# Altium footprint library WR-BHD.PcbLib: 220 footprints (part 9 of 14)
Each footprint in its own frame and in the unit in brackets; x right, y up, seen from the top. Pads: shape width x height; smd on the part's side, far side on the other; paste and mask are expansions set on the pad; w line width, h text height; cw(c..) or ccw(c..) is an arc to the next point about the centre after c.
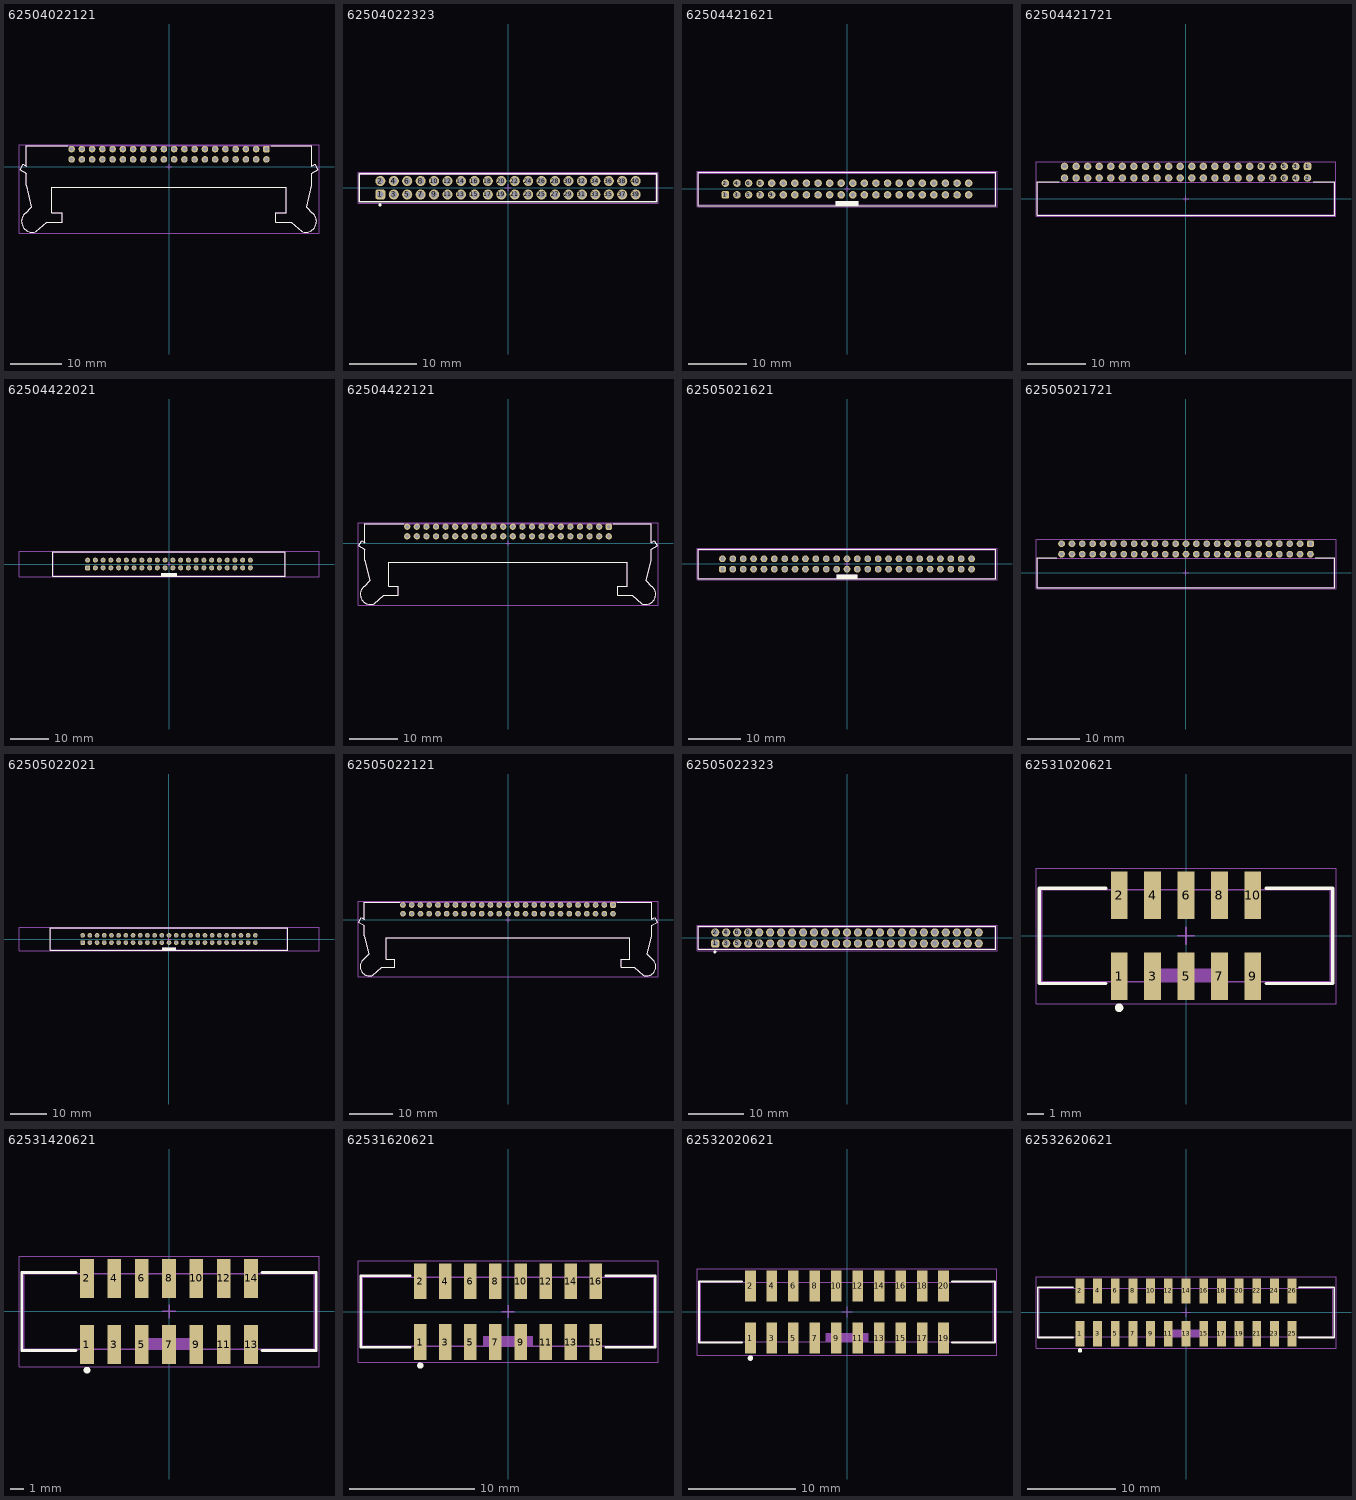
[diagram p8: the footprints below, top view; thin cyan lines are the x and y axes]

## 62504022121 [mm] "2.00mm Male Angled Box Header with Lever, 40p"
height 3.15
pads (40):
  rrect50% 1.3x1.3 hole 0.8: 1(19,3.4)
  round 1.3 hole 0.8: 2(19,1.4) 3(17,3.4) 4(17,1.4) 5(15,3.4) 6(15,1.4) 7(13,3.4) 8(13,1.4) 9(11,3.4) 10(11,1.4) 11(9,3.4) 12(9,1.4) 13(7,3.4) 14(7,1.4) 15(5,3.4) 16(5,1.4) 17(3,3.4) 18(3,1.4) 19(1,3.4) 20(1,1.4) 21(-1,3.4) 22(-1,1.4) 23(-3,3.4) 24(-3,1.4) 25(-5,3.4) 26(-5,1.4) 27(-7,3.4) 28(-7,1.4) 29(-9,3.4) 30(-9,1.4) 31(-11,3.4) 32(-11,1.4) 33(-13,3.4) 34(-13,1.4) 35(-15,3.4) 36(-15,1.4) 37(-17,3.4) 38(-17,1.4) 39(-19,3.4) 40(-19,1.4)
Top Overlay:
  lines w0.2: -28.466,0.438 -29.06,-0.59 -27.851,-1.288 -27.851,-3.622 ; -28.46,0.44 -27.848,0.087 ; -27.894,-8.986 ccw(c-26.68,-10.7) -25.865,-12.635 ; -27.892,-8.989 -26.85,-7.91 -27.837,-3.637 ; -27.85,0.089 -27.85,4.05 -19.75,4.05 ; -25.866,-12.634 -23.85,-10.85 -20.85,-10.85 -20.85,-9.05 -22.85,-9.05 -22.85,-4.05 22.85,-4.05 22.85,-9.05 20.85,-9.05 20.85,-10.85 23.85,-10.85 25.866,-12.634 ; 19.95,4.05 27.85,4.05 27.85,0.089 ; 25.865,-12.635 ccw(c26.68,-10.7) 27.894,-8.986 ; 27.837,-3.637 26.85,-7.91 27.892,-8.989 ; 27.848,0.087 28.46,0.44 ; 27.851,-3.622 27.851,-1.288 29.06,-0.59 28.466,0.438
Top Designator:
  text ".Designator" at -3.647,-0.357 h1
Top 3D Body:
  lines w0.1: -28.466,0.438 -29.06,-0.59 -27.851,-1.288 -27.851,-3.622 ; -28.46,0.44 -27.848,0.087 ; -27.894,-8.986 ccw(c-26.68,-10.7) -25.865,-12.635 ; -27.892,-8.989 -26.85,-7.91 -27.837,-3.637 ; -27.85,0.089 -27.85,4.05 27.85,4.05 ; -25.866,-12.634 -23.85,-10.85 -20.85,-10.85 -20.85,-9.05 -22.85,-9.05 -22.85,-4.05 22.85,-4.05 22.85,-9.05 20.85,-9.05 20.85,-10.85 23.85,-10.85 25.866,-12.634 ; 25.865,-12.635 ccw(c26.68,-10.7) 27.894,-8.986 ; 27.837,-3.637 26.85,-7.91 27.892,-8.989 ; 27.848,0.087 28.46,0.44 ; 27.848,4.048 27.85,4.05 ; 27.85,0.089 27.85,4.05 ; 27.851,-3.622 27.851,-1.288 29.06,-0.59 28.466,0.438
Top Courtyard:
  lines w0.05: -29.262,-13 29.262,-13 29.262,4.25 -29.262,4.25 -29.262,-13
Top Component Center:
  lines w0.1: -0.5,0 0.5,0 ; 0,-0.5 0,0.5
3D body "62504022121.stp": height 6.1, standoff -3.05, extent -29.062,-12.8 29.062,4.05

## 62504022323 [mm] "Board to Cable Transition Connector, pitch 2mm, 40p"
height 5
pads (40):
  rrect50% 1.5x1.5 hole 1: 1(-19,-1)
  round 1.5 hole 1: 2(-19,1) 3(-17,-1) 4(-17,1) 5(-15,-1) 6(-15,1) 7(-13,-1) 8(-13,1) 9(-11,-1) 10(-11,1) 11(-9,-1) 12(-9,1) 13(-7,-1) 14(-7,1) 15(-5,-1) 16(-5,1) 17(-3,-1) 18(-3,1) 19(-1,-1) 20(-1,1) 21(1,-1) 22(1,1) 23(3,-1) 24(3,1) 25(5,-1) 26(5,1) 27(7,-1) 28(7,1) 29(9,-1) 30(9,1) 31(11,-1) 32(11,1) 33(13,-1) 34(13,1) 35(15,-1) 36(15,1) 37(17,-1) 38(17,1) 39(19,-1) 40(19,1)
Top Overlay:
  circle w0.25: c-19.05,-2.55 r0.125
  lines w0.2: -22.125,-2.1 -22.125,2.1 22.125,2.1 22.125,-2.1 -22.125,-2.1
Top Assembly:
  lines w0.1: -22.05,-2 -22.05,2 22.05,2 22.05,-2 -22.05,-2
Top Designator:
  text ".Designator" at -3.647,-0.357 h1
Top 3D Body:
  lines w0.1: -22.05,-2 22.05,-2 22.05,2 -22.05,2 -22.05,-2
Top Courtyard:
  lines w0.05: -22.325,-2.3 22.325,-2.3 22.325,2.3 -22.325,2.3 -22.325,-2.3
Top Component Center:
  lines w0.1: -0.5,0 0.5,0 ; 0,-0.5 0,0.5
3D body "62504022323.stp": height 7.23, standoff -2.77, extent -22.05,-2 22.05,2

## 62504421621 [mm] "2.00mm Male Box Header, 44p"
height 5.6
pads (44):
  rrect50% 1.3x1.3 hole 0.8: 1(-21,-1)
  round 1.3 hole 0.8: 2(-21,1) 3(-19,-1) 4(-19,1) 5(-17,-1) 6(-17,1) 7(-15,-1) 8(-15,1) 9(-13,-1) 10(-13,1) 11(-11,-1) 12(-11,1) 13(-9,-1) 14(-9,1) 15(-7,-1) 16(-7,1) 17(-5,-1) 18(-5,1) 19(-3,-1) 20(-3,1) 21(-1,-1) 22(-1,1) 23(1,-1) 24(1,1) 25(3,-1) 26(3,1) 27(5,-1) 28(5,1) 29(7,-1) 30(7,1) 31(9,-1) 32(9,1) 33(11,-1) 34(11,1) 35(13,-1) 36(13,1) 37(15,-1) 38(15,1) 39(17,-1) 40(17,1) 41(19,-1) 42(19,1) 43(21,-1) 44(21,1)
Top Overlay:
  rectangle: -2,-2.85 2,-2.05
  lines w0.2: -25.7,-2.85 -25.7,2.85 25.7,2.85 25.7,-2.85 -25.7,-2.85
Top Assembly:
  rectangle: -2,-2.75 2,-2.05
  lines w0.1: -25.6,-2.75 25.6,-2.75 25.6,2.75 -25.6,2.75 -25.6,-2.75
Top Designator:
  text ".Designator" at -3.647,-0.357 h1
Top 3D Body:
  rectangle: -2,-2.75 2,-2.05
  lines w0.1: -25.6,-2.75 -25.6,2.75 25.6,2.75 25.6,-2.75 -25.6,-2.75
Top Courtyard:
  lines w0.05: -25.9,-3.05 25.9,-3.05 25.9,3.05 -25.9,3.05 -25.9,-3.05
Top Component Center:
  lines w0.1: -0.5,0 0.5,0 ; 0,-0.5 0,0.5
3D body "62504421621.stp": height 5.65, standoff -2.5, extent -25.6,-2.75 25.6,2.75

## 62504421721 [mm] "2.00mm Male Angled Box Header, 44p"
height 5.4
pads (44):
  rrect50% 1.3x1.3 hole 0.8: 1(21,5.55)
  round 1.3 hole 0.8: 2(21,3.55) 3(19,5.55) 4(19,3.55) 5(17,5.55) 6(17,3.55) 7(15,5.55) 8(15,3.55) 9(13,5.55) 10(13,3.55) 11(11,5.55) 12(11,3.55) 13(9,5.55) 14(9,3.55) 15(7,5.55) 16(7,3.55) 17(5,5.55) 18(5,3.55) 19(3,5.55) 20(3,3.55) 21(1,5.55) 22(1,3.55) 23(-1,5.55) 24(-1,3.55) 25(-3,5.55) 26(-3,3.55) 27(-5,5.55) 28(-5,3.55) 29(-7,5.55) 30(-7,3.55) 31(-9,5.55) 32(-9,3.55) 33(-11,5.55) 34(-11,3.55) 35(-13,5.55) 36(-13,3.55) 37(-15,5.55) 38(-15,3.55) 39(-17,5.55) 40(-17,3.55) 41(-19,5.55) 42(-19,3.55) 43(-21,5.55) 44(-21,3.55)
Top Overlay:
  lines w0.2: -21.9,2.9 -25.725,2.9 -25.725,-2.9 25.725,-2.9 25.725,2.9 21.95,2.9
Top Assembly:
  lines w0.1: -25.6,-2.8 25.6,-2.8 25.6,2.8 -25.6,2.8 -25.6,-2.8
Top Designator:
  text ".Designator" at -3.647,-0.357 h1
Top 3D Body:
  lines w0.1: -25.6,-2.8 -25.6,2.8 25.6,2.8 25.6,-2.8 -25.6,-2.8
Top Courtyard:
  lines w0.05: -25.925,-3.1 25.925,-3.1 25.925,6.4 -25.925,6.4 -25.925,-3.1
Top Component Center:
  lines w0.1: -0.5,0 0.5,0 ; 0,-0.5 0,0.5
3D body "62504421721 (rev1).stp": height 5.5, standoff -2.85, extent -25.6,-2.8 25.6,5.8

## 62504422021 [mm] "2.00mm Male Box Header with Lever, 44p"
height 16.85
pads (44):
  rrect50% 1.3x1.3 hole 0.8: 1(-21,-1)
  round 1.3 hole 0.8: 2(-21,1) 3(-19,-1) 4(-19,1) 5(-17,-1) 6(-17,1) 7(-15,-1) 8(-15,1) 9(-13,-1) 10(-13,1) 11(-11,-1) 12(-11,1) 13(-9,-1) 14(-9,1) 15(-7,-1) 16(-7,1) 17(-5,-1) 18(-5,1) 19(-3,-1) 20(-3,1) 21(-1,-1) 22(-1,1) 23(1,-1) 24(1,1) 25(3,-1) 26(3,1) 27(5,-1) 28(5,1) 29(7,-1) 30(7,1) 31(9,-1) 32(9,1) 33(11,-1) 34(11,1) 35(13,-1) 36(13,1) 37(15,-1) 38(15,1) 39(17,-1) 40(17,1) 41(19,-1) 42(19,1) 43(21,-1) 44(21,1)
Top Overlay:
  rectangle: -2,-3.1 2,-2.3
  lines w0.2: -30,-3.1 30,-3.1 30,3.1 -30,3.1 -30,-3.1
Top Assembly:
  rectangle: -2,-3 2,-2.3
  lines w0.1: -29.85,-3 29.85,-3 29.85,3 -29.85,3 -29.85,-3
Top Designator:
  text ".Designator" at -3.647,-0.357 h1
Top 3D Body:
  rectangle: -2,-3 2,-2.3
  lines w0.1: -29.85,-3 -29.85,3 29.85,3 29.85,-3 -29.85,-3
Top Courtyard:
  lines w0.05: -38.7,-3.3 -38.7,3.3 38.7,3.3 38.7,-3.3 -38.7,-3.3
Top Component Center:
  lines w0.1: -0.5,0 0.5,0 ; 0,-0.5 0,0.5
3D body "62504422021.stp": height 16.9, standoff -2.95, extent -31.062,-3 31.063,3

## 62504422121 [mm] "2.00mm Male Angled Box Header with Lever, 44p"
height 3.15
pads (44):
  rrect50% 1.3x1.3 hole 0.8: 1(21,3.4)
  round 1.3 hole 0.8: 2(21,1.4) 3(19,3.4) 4(19,1.4) 5(17,3.4) 6(17,1.4) 7(15,3.4) 8(15,1.4) 9(13,3.4) 10(13,1.4) 11(11,3.4) 12(11,1.4) 13(9,3.4) 14(9,1.4) 15(7,3.4) 16(7,1.4) 17(5,3.4) 18(5,1.4) 19(3,3.4) 20(3,1.4) 21(1,3.4) 22(1,1.4) 23(-1,3.4) 24(-1,1.4) 25(-3,3.4) 26(-3,1.4) 27(-5,3.4) 28(-5,1.4) 29(-7,3.4) 30(-7,1.4) 31(-9,3.4) 32(-9,1.4) 33(-11,3.4) 34(-11,1.4) 35(-13,3.4) 36(-13,1.4) 37(-15,3.4) 38(-15,1.4) 39(-17,3.4) 40(-17,1.4) 41(-19,3.4) 42(-19,1.4) 43(-21,3.4) 44(-21,1.4)
Top Overlay:
  lines w0.2: -30.466,0.438 -31.06,-0.59 -29.851,-1.288 -29.851,-3.622 ; -30.46,0.44 -29.848,0.087 ; -29.894,-8.986 ccw(c-28.68,-10.7) -27.865,-12.635 ; -29.892,-8.989 -28.85,-7.91 -29.837,-3.637 ; -29.85,0.089 -29.85,4.05 -21.75,4.05 ; -27.866,-12.634 -25.85,-10.85 -22.85,-10.85 -22.85,-9.05 -24.85,-9.05 -24.85,-4.05 24.85,-4.05 24.85,-9.05 22.85,-9.05 22.85,-10.85 25.85,-10.85 27.866,-12.634 ; 21.95,4.05 29.85,4.05 29.85,0.089 ; 27.865,-12.635 ccw(c28.68,-10.7) 29.894,-8.986 ; 29.837,-3.637 28.85,-7.91 29.892,-8.989 ; 29.848,0.087 30.46,0.44 ; 29.851,-3.622 29.851,-1.288 31.06,-0.59 30.466,0.438
Top Designator:
  text ".Designator" at -3.647,-0.357 h1
Top 3D Body:
  lines w0.1: -30.466,0.438 -31.06,-0.59 -29.851,-1.288 -29.851,-3.622 ; -30.46,0.44 -29.848,0.087 ; -29.894,-8.986 ccw(c-28.68,-10.7) -27.865,-12.635 ; -29.892,-8.989 -28.85,-7.91 -29.837,-3.637 ; -29.85,0.089 -29.85,4.05 29.85,4.05 ; -27.866,-12.634 -25.85,-10.85 -22.85,-10.85 -22.85,-9.05 -24.85,-9.05 -24.85,-4.05 24.85,-4.05 24.85,-9.05 22.85,-9.05 22.85,-10.85 25.85,-10.85 27.866,-12.634 ; 27.865,-12.635 ccw(c28.68,-10.7) 29.894,-8.986 ; 29.837,-3.637 28.85,-7.91 29.892,-8.989 ; 29.848,0.087 30.46,0.44 ; 29.848,4.048 29.85,4.05 ; 29.85,0.089 29.85,4.05 ; 29.851,-3.622 29.851,-1.288 31.06,-0.59 30.466,0.438
Top Courtyard:
  lines w0.05: -31.262,-13 31.262,-13 31.262,4.25 -31.262,4.25 -31.262,-13
Top Component Center:
  lines w0.1: -0.5,0 0.5,0 ; 0,-0.5 0,0.5
3D body "62504422121.stp": height 6.1, standoff -3.05, extent -31.062,-12.8 31.062,4.05

## 62505021621 [mm] "2.00mm Male Box Header, 50p"
height 5.6
pads (50):
  rrect50% 1.3x1.3 hole 0.8: 1(-24,-1)
  round 1.3 hole 0.8: 2(-24,1) 3(-22,-1) 4(-22,1) 5(-20,-1) 6(-20,1) 7(-18,-1) 8(-18,1) 9(-16,-1) 10(-16,1) 11(-14,-1) 12(-14,1) 13(-12,-1) 14(-12,1) 15(-10,-1) 16(-10,1) 17(-8,-1) 18(-8,1) 19(-6,-1) 20(-6,1) 21(-4,-1) 22(-4,1) 23(-2,-1) 24(-2,1) 25(0,-1) 26(0,1) 27(2,-1) 28(2,1) 29(4,-1) 30(4,1) 31(6,-1) 32(6,1) 33(8,-1) 34(8,1) 35(10,-1) 36(10,1) 37(12,-1) 38(12,1) 39(14,-1) 40(14,1) 41(16,-1) 42(16,1) 43(18,-1) 44(18,1) 45(20,-1) 46(20,1) 47(22,-1) 48(22,1) 49(24,-1) 50(24,1)
Top Overlay:
  rectangle: -2,-2.85 2,-2.05
  lines w0.2: -28.7,-2.85 -28.7,2.85 28.7,2.85 28.7,-2.85 -28.7,-2.85
Top Assembly:
  rectangle: -2,-2.75 2,-2.05
  lines w0.1: -28.6,-2.75 28.6,-2.75 28.6,2.75 -28.6,2.75 -28.6,-2.75
Top Designator:
  text ".Designator" at -3.647,-0.357 h1
Top 3D Body:
  rectangle: -2,-2.75 2,-2.05
  lines w0.1: -28.6,-2.75 -28.6,2.75 28.6,2.75 28.6,-2.75 -28.6,-2.75
Top Courtyard:
  lines w0.05: -28.9,-3.05 28.9,-3.05 28.9,3.05 -28.9,3.05 -28.9,-3.05
Top Component Center:
  lines w0.1: -0.5,0 0.5,0 ; 0,-0.5 0,0.5
3D body "62505021621.stp": height 5.65, standoff -2.45, extent -28.6,-2.75 28.6,2.75

## 62505021721 [mm] "2.00mm Male Angled Box Header, 50p"
height 5.4
pads (50):
  rrect50% 1.3x1.3 hole 0.8: 1(24,5.55)
  round 1.3 hole 0.8: 2(24,3.55) 3(22,5.55) 4(22,3.55) 5(20,5.55) 6(20,3.55) 7(18,5.55) 8(18,3.55) 9(16,5.55) 10(16,3.55) 11(14,5.55) 12(14,3.55) 13(12,5.55) 14(12,3.55) 15(10,5.55) 16(10,3.55) 17(8,5.55) 18(8,3.55) 19(6,5.55) 20(6,3.55) 21(4,5.55) 22(4,3.55) 23(2,5.55) 24(2,3.55) 25(0,5.55) 26(0,3.55) 27(-2,5.55) 28(-2,3.55) 29(-4,5.55) 30(-4,3.55) 31(-6,5.55) 32(-6,3.55) 33(-8,5.55) 34(-8,3.55) 35(-10,5.55) 36(-10,3.55) 37(-12,5.55) 38(-12,3.55) 39(-14,5.55) 40(-14,3.55) 41(-16,5.55) 42(-16,3.55) 43(-18,5.55) 44(-18,3.55) 45(-20,5.55) 46(-20,3.55) 47(-22,5.55) 48(-22,3.55) 49(-24,5.55) 50(-24,3.55)
Top Overlay:
  lines w0.2: -24.9,2.9 -28.725,2.9 -28.725,-2.9 28.725,-2.9 28.725,2.9 24.95,2.9
Top Assembly:
  lines w0.1: -28.6,-2.8 28.6,-2.8 28.6,2.8 -28.6,2.8 -28.6,-2.8
Top Designator:
  text ".Designator" at -3.647,-0.357 h1
Top 3D Body:
  lines w0.1: -28.6,-2.8 -28.6,2.8 28.6,2.8 28.6,-2.8 -28.6,-2.8
Top Courtyard:
  lines w0.05: -28.925,-3.1 28.925,-3.1 28.925,6.4 -28.925,6.4 -28.925,-3.1
Top Component Center:
  lines w0.1: -0.5,0 0.5,0 ; 0,-0.5 0,0.5
3D body "62505021721 (rev1).stp": height 5.5, standoff -2.85, extent -28.6,-2.8 28.6,5.8

## 62505022021 [mm] "2.00mm Male Box Header with Lever, 50p"
height 16.85
pads (50):
  rrect50% 1.3x1.3 hole 0.8: 1(-24,-1)
  round 1.3 hole 0.8: 2(-24,1) 3(-22,-1) 4(-22,1) 5(-20,-1) 6(-20,1) 7(-18,-1) 8(-18,1) 9(-16,-1) 10(-16,1) 11(-14,-1) 12(-14,1) 13(-12,-1) 14(-12,1) 15(-10,-1) 16(-10,1) 17(-8,-1) 18(-8,1) 19(-6,-1) 20(-6,1) 21(-4,-1) 22(-4,1) 23(-2,-1) 24(-2,1) 25(0,-1) 26(0,1) 27(2,-1) 28(2,1) 29(4,-1) 30(4,1) 31(6,-1) 32(6,1) 33(8,-1) 34(8,1) 35(10,-1) 36(10,1) 37(12,-1) 38(12,1) 39(14,-1) 40(14,1) 41(16,-1) 42(16,1) 43(18,-1) 44(18,1) 45(20,-1) 46(20,1) 47(22,-1) 48(22,1) 49(24,-1) 50(24,1)
Top Overlay:
  rectangle: -2,-3.1 2,-2.3
  lines w0.2: -33,-3.1 33,-3.1 33,3.1 -33,3.1 -33,-3.1
Top Assembly:
  rectangle: -2,-3 2,-2.3
  lines w0.1: -32.85,-3 32.85,-3 32.85,3 -32.85,3 -32.85,-3
Top Designator:
  text ".Designator" at -3.647,-0.357 h1
Top 3D Body:
  rectangle: -2,-3 2,-2.3
  lines w0.1: -32.85,-3 -32.85,3 32.85,3 32.85,-3 -32.85,-3
Top Courtyard:
  lines w0.05: -41.7,-3.3 -41.7,3.3 41.7,3.3 41.7,-3.3 -41.7,-3.3
Top Component Center:
  lines w0.1: -0.5,0 0.5,0 ; 0,-0.5 0,0.5
3D body "62505022021.stp": height 16.9, standoff -2.95, extent -34.062,-3 34.063,3

## 62505022121 [mm] "2.00mm Male Angled Box Header with Lever, 50p"
height 3.15
pads (50):
  rrect50% 1.3x1.3 hole 0.8: 1(24,3.4)
  round 1.3 hole 0.8: 2(24,1.4) 3(22,3.4) 4(22,1.4) 5(20,3.4) 6(20,1.4) 7(18,3.4) 8(18,1.4) 9(16,3.4) 10(16,1.4) 11(14,3.4) 12(14,1.4) 13(12,3.4) 14(12,1.4) 15(10,3.4) 16(10,1.4) 17(8,3.4) 18(8,1.4) 19(6,3.4) 20(6,1.4) 21(4,3.4) 22(4,1.4) 23(2,3.4) 24(2,1.4) 25(0,3.4) 26(0,1.4) 27(-2,3.4) 28(-2,1.4) 29(-4,3.4) 30(-4,1.4) 31(-6,3.4) 32(-6,1.4) 33(-8,3.4) 34(-8,1.4) 35(-10,3.4) 36(-10,1.4) 37(-12,3.4) 38(-12,1.4) 39(-14,3.4) 40(-14,1.4) 41(-16,3.4) 42(-16,1.4) 43(-18,3.4) 44(-18,1.4) 45(-20,3.4) 46(-20,1.4) 47(-22,3.4) 48(-22,1.4) 49(-24,3.4) 50(-24,1.4)
Top Overlay:
  lines w0.2: -33.466,0.438 -34.06,-0.59 -32.851,-1.288 -32.851,-3.622 ; -33.46,0.44 -32.848,0.087 ; -32.894,-8.986 ccw(c-31.68,-10.7) -30.865,-12.635 ; -32.892,-8.989 -31.85,-7.91 -32.837,-3.637 ; -32.85,0.089 -32.85,4.05 -24.75,4.05 ; -30.866,-12.634 -28.85,-10.85 -25.85,-10.85 -25.85,-9.05 -27.85,-9.05 -27.85,-4.05 27.85,-4.05 27.85,-9.05 25.85,-9.05 25.85,-10.85 28.85,-10.85 30.866,-12.634 ; 24.95,4.05 32.85,4.05 32.85,0.089 ; 30.865,-12.635 ccw(c31.68,-10.7) 32.894,-8.986 ; 32.837,-3.637 31.85,-7.91 32.892,-8.989 ; 32.848,0.087 33.46,0.44 ; 32.851,-3.622 32.851,-1.288 34.06,-0.59 33.466,0.438
Top Designator:
  text ".Designator" at -3.647,-0.357 h1
Top 3D Body:
  lines w0.1: -33.466,0.438 -34.06,-0.59 -32.851,-1.288 -32.851,-3.622 ; -33.46,0.44 -32.848,0.087 ; -32.894,-8.986 ccw(c-31.68,-10.7) -30.865,-12.635 ; -32.892,-8.989 -31.85,-7.91 -32.837,-3.637 ; -32.85,0.089 -32.85,4.05 32.85,4.05 ; -30.866,-12.634 -28.85,-10.85 -25.85,-10.85 -25.85,-9.05 -27.85,-9.05 -27.85,-4.05 27.85,-4.05 27.85,-9.05 25.85,-9.05 25.85,-10.85 28.85,-10.85 30.866,-12.634 ; 30.865,-12.635 ccw(c31.68,-10.7) 32.894,-8.986 ; 32.837,-3.637 31.85,-7.91 32.892,-8.989 ; 32.848,0.087 33.46,0.44 ; 32.848,4.048 32.85,4.05 ; 32.85,0.089 32.85,4.05 ; 32.851,-3.622 32.851,-1.288 34.06,-0.59 33.466,0.438
Top Courtyard:
  lines w0.05: -34.262,-13 -34.262,4.25 34.262,4.25 34.262,-13 -34.262,-13
Top Component Center:
  lines w0.1: -0.5,0 0.5,0 ; 0,-0.5 0,0.5
3D body "62505022121.stp": height 6.1, standoff -3.05, extent -34.062,-12.8 34.062,4.05

## 62505022323 [mm] "Board to Cable Transition Connector, pitch 2mm, 50p"
height 5
pads (50):
  rrect50% 1.5x1.5 hole 1: 1(-24,-1)
  round 1.5 hole 1: 2(-24,1) 3(-22,-1) 4(-22,1) 5(-20,-1) 6(-20,1) 7(-18,-1) 8(-18,1) 9(-16,-1) 10(-16,1) 11(-14,-1) 12(-14,1) 13(-12,-1) 14(-12,1) 15(-10,-1) 16(-10,1) 17(-8,-1) 18(-8,1) 19(-6,-1) 20(-6,1) 21(-4,-1) 22(-4,1) 23(-2,-1) 24(-2,1) 25(0,-1) 26(0,1) 27(2,-1) 28(2,1) 29(4,-1) 30(4,1) 31(6,-1) 32(6,1) 33(8,-1) 34(8,1) 35(10,-1) 36(10,1) 37(12,-1) 38(12,1) 39(14,-1) 40(14,1) 41(16,-1) 42(16,1) 43(18,-1) 44(18,1) 45(20,-1) 46(20,1) 47(22,-1) 48(22,1) 49(24,-1) 50(24,1)
Top Overlay:
  circle w0.25: c-24.05,-2.55 r0.125
  lines w0.2: -27.125,-2.1 27.125,-2.1 27.125,2.1 -27.125,2.1 -27.125,-2.1
Top Assembly:
  lines w0.1: -27.05,-2 27.05,-2 27.05,2 -27.05,2 -27.05,-2
Top Designator:
  text ".Designator" at -3.647,-0.357 h1
Top 3D Body:
  lines w0.1: -27.05,-2 -27.05,2 27.05,2 27.05,-2 -27.05,-2
Top Courtyard:
  lines w0.05: -27.325,-2.3 -27.325,2.3 27.325,2.3 27.325,-2.3 -27.325,-2.3
Top Component Center:
  lines w0.1: -0.5,0 0.5,0 ; 0,-0.5 0,0.5
3D body "62505022323.stp": height 7.23, standoff -2.77, extent -27.05,-2 27.05,2

## 62531020621 [mm] "2.00mm Male SMT Box Header, 10p"
height 6.8
pads (10):
  rect 1x2.85 smd: 1(-4,-2.425) 2(-4,2.425) 3(-2,-2.425) 4(-2,2.425) 5(0,-2.425) 6(0,2.425) 7(2,-2.425) 8(2,2.425) 9(4,-2.425) 10(4,2.425)
Top Overlay:
  circle w0.25: c-4,-4.3 r0.125
  lines w0.2: -4.8,-2.85 -8.775,-2.85 -8.775,2.85 -4.8,2.85 ; 4.8,-2.85 8.775,-2.85 8.775,2.85 4.8,2.85
Top Assembly:
  rectangle: -2,-2.75 2,-1.95
  lines w0.1: -4.25,-2.75 -4.25,-3.75 -3.75,-3.75 -3.75,-2.75 ; -4.25,2.75 -4.25,3.75 -3.75,3.75 -3.75,2.75 ; -2.25,-2.75 -2.25,-3.75 -1.75,-3.75 -1.75,-2.75 ; -2.25,2.75 -2.25,3.75 -1.75,3.75 -1.75,2.75 ; -0.25,-2.75 -0.25,-3.75 0.25,-3.75 0.25,-2.75 ; -0.25,2.75 -0.25,3.75 0.25,3.75 0.25,2.75 ; 1.75,-2.75 1.75,-3.75 2.25,-3.75 2.25,-2.75 ; 1.75,2.75 1.75,3.75 2.25,3.75 2.25,2.75 ; 3.75,-2.75 3.75,-3.75 4.25,-3.75 4.25,-2.75 ; 3.75,2.75 3.75,3.75 4.25,3.75 4.25,2.75 ; -8.625,-2.75 -8.625,2.75 8.625,2.75 8.625,-2.75 -8.625,-2.75
Top Designator:
  text ".Designator" at -3.647,-0.357 h1
Top 3D Body:
  rectangle: -2,-2.75 2,-1.95
  lines w0.1: -4.25,-2.75 -4.25,-3.75 -3.75,-3.75 -3.75,-2.75 ; -4.25,2.75 -4.25,3.75 -3.75,3.75 -3.75,2.75 ; -2.25,-2.75 -2.25,-3.75 -1.75,-3.75 -1.75,-2.75 ; -2.25,2.75 -2.25,3.75 -1.75,3.75 -1.75,2.75 ; -0.25,-2.75 -0.25,-3.75 0.25,-3.75 0.25,-2.75 ; -0.25,2.75 -0.25,3.75 0.25,3.75 0.25,2.75 ; 1.75,-2.75 1.75,-3.75 2.25,-3.75 2.25,-2.75 ; 1.75,2.75 1.75,3.75 2.25,3.75 2.25,2.75 ; 3.75,-2.75 3.75,-3.75 4.25,-3.75 4.25,-2.75 ; 3.75,2.75 3.75,3.75 4.25,3.75 4.25,2.75 ; -8.625,-2.75 8.625,-2.75 8.625,2.75 -8.625,2.75 -8.625,-2.75
Top Courtyard:
  lines w0.05: -8.975,-4.05 8.975,-4.05 8.975,4.05 -8.975,4.05 -8.975,-4.05
Top Component Center:
  lines w0.1: -0.5,0 0.5,0 ; 0,-0.5 0,0.5
3D body "62531020621 (rev1).stp": height 8.55, standoff 0, extent -8.625,-3.75 8.625,3.75

## 62531420621 [mm] "2.00mm Male SMT Box Header, 14p"
height 6.8
pads (14):
  rect 1x2.85 smd: 1(-6,-2.425) 2(-6,2.425) 3(-4,-2.425) 4(-4,2.425) 5(-2,-2.425) 6(-2,2.425) 7(0,-2.425) 8(0,2.425) 9(2,-2.425) 10(2,2.425) 11(4,-2.425) 12(4,2.425) 13(6,-2.425) 14(6,2.425)
Top Overlay:
  circle w0.25: c-6,-4.3 r0.125
  lines w0.2: -6.8,-2.85 -10.775,-2.85 -10.775,2.85 -6.8,2.85 ; 6.8,-2.85 10.775,-2.85 10.775,2.85 6.8,2.85
Top Assembly:
  rectangle: -2,-2.75 2,-1.95
  lines w0.1: -6.25,-2.75 -6.25,-3.75 -5.75,-3.75 -5.75,-2.75 ; -6.25,2.75 -6.25,3.75 -5.75,3.75 -5.75,2.75 ; -4.25,-2.75 -4.25,-3.75 -3.75,-3.75 -3.75,-2.75 ; -4.25,2.75 -4.25,3.75 -3.75,3.75 -3.75,2.75 ; -2.25,-2.75 -2.25,-3.75 -1.75,-3.75 -1.75,-2.75 ; -2.25,2.75 -2.25,3.75 -1.75,3.75 -1.75,2.75 ; -0.25,-2.75 -0.25,-3.75 0.25,-3.75 0.25,-2.75 ; -0.25,2.75 -0.25,3.75 0.25,3.75 0.25,2.75 ; 1.75,-2.75 1.75,-3.75 2.25,-3.75 2.25,-2.75 ; 1.75,2.75 1.75,3.75 2.25,3.75 2.25,2.75 ; 3.75,-2.75 3.75,-3.75 4.25,-3.75 4.25,-2.75 ; 3.75,2.75 3.75,3.75 4.25,3.75 4.25,2.75 ; 5.75,-2.75 5.75,-3.75 6.25,-3.75 6.25,-2.75 ; 5.75,2.75 5.75,3.75 6.25,3.75 6.25,2.75 ; -10.625,-2.75 10.625,-2.75 10.625,2.75 -10.625,2.75 -10.625,-2.75
Top Designator:
  text ".Designator" at -3.647,-0.357 h1
Top 3D Body:
  rectangle: -2,-2.75 2,-1.95
  lines w0.1: -6.25,-2.75 -6.25,-3.75 -5.75,-3.75 -5.75,-2.75 ; -6.25,2.75 -6.25,3.75 -5.75,3.75 -5.75,2.75 ; -4.25,-2.75 -4.25,-3.75 -3.75,-3.75 -3.75,-2.75 ; -4.25,2.75 -4.25,3.75 -3.75,3.75 -3.75,2.75 ; -2.25,-2.75 -2.25,-3.75 -1.75,-3.75 -1.75,-2.75 ; -2.25,2.75 -2.25,3.75 -1.75,3.75 -1.75,2.75 ; -0.25,-2.75 -0.25,-3.75 0.25,-3.75 0.25,-2.75 ; -0.25,2.75 -0.25,3.75 0.25,3.75 0.25,2.75 ; 1.75,-2.75 1.75,-3.75 2.25,-3.75 2.25,-2.75 ; 1.75,2.75 1.75,3.75 2.25,3.75 2.25,2.75 ; 3.75,-2.75 3.75,-3.75 4.25,-3.75 4.25,-2.75 ; 3.75,2.75 3.75,3.75 4.25,3.75 4.25,2.75 ; 5.75,-2.75 5.75,-3.75 6.25,-3.75 6.25,-2.75 ; 5.75,2.75 5.75,3.75 6.25,3.75 6.25,2.75 ; -10.625,-2.75 -10.625,2.75 10.625,2.75 10.625,-2.75 -10.625,-2.75
Top Courtyard:
  lines w0.05: -10.975,-4.05 -10.975,4.05 10.975,4.05 10.975,-4.05 -10.975,-4.05
Top Component Center:
  lines w0.1: -0.5,0 0.5,0 ; 0,-0.5 0,0.5
3D body "62531420621 (rev1).stp": height 8.55, standoff 0, extent -10.625,-3.75 10.625,3.75

## 62531620621 [mm] "2.00mm Male SMT Box Header, 16p"
height 6.8
pads (16):
  rect 1x2.85 smd: 1(-7,-2.425) 2(-7,2.425) 3(-5,-2.425) 4(-5,2.425) 5(-3,-2.425) 6(-3,2.425) 7(-1,-2.425) 8(-1,2.425) 9(1,-2.425) 10(1,2.425) 11(3,-2.425) 12(3,2.425) 13(5,-2.425) 14(5,2.425) 15(7,-2.425) 16(7,2.425)
Top Overlay:
  circle w0.25: c-7,-4.3 r0.125
  lines w0.2: -7.8,-2.85 -11.775,-2.85 -11.775,2.85 -7.8,2.85 ; 7.8,-2.85 11.775,-2.85 11.775,2.85 7.8,2.85
Top Assembly:
  rectangle: -2,-2.75 2,-1.95
  lines w0.1: -7.25,-2.75 -7.25,-3.75 -6.75,-3.75 -6.75,-2.75 ; -7.25,2.75 -7.25,3.75 -6.75,3.75 -6.75,2.75 ; -5.25,-2.75 -5.25,-3.75 -4.75,-3.75 -4.75,-2.75 ; -5.25,2.75 -5.25,3.75 -4.75,3.75 -4.75,2.75 ; -3.25,-2.75 -3.25,-3.75 -2.75,-3.75 -2.75,-2.75 ; -3.25,2.75 -3.25,3.75 -2.75,3.75 -2.75,2.75 ; -1.25,-2.75 -1.25,-3.75 -0.75,-3.75 -0.75,-2.75 ; -1.25,2.75 -1.25,3.75 -0.75,3.75 -0.75,2.75 ; 0.75,-2.75 0.75,-3.75 1.25,-3.75 1.25,-2.75 ; 0.75,2.75 0.75,3.75 1.25,3.75 1.25,2.75 ; 2.75,-2.75 2.75,-3.75 3.25,-3.75 3.25,-2.75 ; 2.75,2.75 2.75,3.75 3.25,3.75 3.25,2.75 ; 4.75,-2.75 4.75,-3.75 5.25,-3.75 5.25,-2.75 ; 4.75,2.75 4.75,3.75 5.25,3.75 5.25,2.75 ; 6.75,-2.75 6.75,-3.75 7.25,-3.75 7.25,-2.75 ; 6.75,2.75 6.75,3.75 7.25,3.75 7.25,2.75 ; -11.625,-2.75 -11.625,2.75 11.625,2.75 11.625,-2.75 -11.625,-2.75
Top Designator:
  text ".Designator" at -3.647,-0.357 h1
Top 3D Body:
  rectangle: -2,-2.75 2,-1.95
  lines w0.1: -7.25,-2.75 -7.25,-3.75 -6.75,-3.75 -6.75,-2.75 ; -7.25,2.75 -7.25,3.75 -6.75,3.75 -6.75,2.75 ; -5.25,-2.75 -5.25,-3.75 -4.75,-3.75 -4.75,-2.75 ; -5.25,2.75 -5.25,3.75 -4.75,3.75 -4.75,2.75 ; -3.25,-2.75 -3.25,-3.75 -2.75,-3.75 -2.75,-2.75 ; -3.25,2.75 -3.25,3.75 -2.75,3.75 -2.75,2.75 ; -1.25,-2.75 -1.25,-3.75 -0.75,-3.75 -0.75,-2.75 ; -1.25,2.75 -1.25,3.75 -0.75,3.75 -0.75,2.75 ; 0.75,-2.75 0.75,-3.75 1.25,-3.75 1.25,-2.75 ; 0.75,2.75 0.75,3.75 1.25,3.75 1.25,2.75 ; 2.75,-2.75 2.75,-3.75 3.25,-3.75 3.25,-2.75 ; 2.75,2.75 2.75,3.75 3.25,3.75 3.25,2.75 ; 4.75,-2.75 4.75,-3.75 5.25,-3.75 5.25,-2.75 ; 4.75,2.75 4.75,3.75 5.25,3.75 5.25,2.75 ; 6.75,-2.75 6.75,-3.75 7.25,-3.75 7.25,-2.75 ; 6.75,2.75 6.75,3.75 7.25,3.75 7.25,2.75 ; -11.625,-2.75 11.625,-2.75 11.625,2.75 -11.625,2.75 -11.625,-2.75
Top Courtyard:
  lines w0.05: -11.975,-4.05 11.975,-4.05 11.975,4.05 -11.975,4.05 -11.975,-4.05
Top Component Center:
  lines w0.1: -0.5,0 0.5,0 ; 0,-0.5 0,0.5
3D body "62531620621 (rev1).stp": height 8.55, standoff 0, extent -11.625,-3.75 11.625,3.75

## 62532020621 [mm] "2.00mm Male SMT Box Header, 20p"
height 6.8
pads (20):
  rect 1x2.85 smd: 1(-9,-2.425) 2(-9,2.425) 3(-7,-2.425) 4(-7,2.425) 5(-5,-2.425) 6(-5,2.425) 7(-3,-2.425) 8(-3,2.425) 9(-1,-2.425) 10(-1,2.425) 11(1,-2.425) 12(1,2.425) 13(3,-2.425) 14(3,2.425) 15(5,-2.425) 16(5,2.425) 17(7,-2.425) 18(7,2.425) 19(9,-2.425) 20(9,2.425)
Top Overlay:
  circle w0.25: c-9,-4.3 r0.125
  lines w0.2: -9.8,-2.85 -13.775,-2.85 -13.775,2.85 -9.8,2.85 ; 9.8,-2.85 13.775,-2.85 13.775,2.85 9.8,2.85
Top Assembly:
  rectangle: -2,-2.75 2,-1.95
  lines w0.1: -9.25,-2.75 -9.25,-3.75 -8.75,-3.75 -8.75,-2.75 ; -9.25,2.75 -9.25,3.75 -8.75,3.75 -8.75,2.75 ; -7.25,-2.75 -7.25,-3.75 -6.75,-3.75 -6.75,-2.75 ; -7.25,2.75 -7.25,3.75 -6.75,3.75 -6.75,2.75 ; -5.25,-2.75 -5.25,-3.75 -4.75,-3.75 -4.75,-2.75 ; -5.25,2.75 -5.25,3.75 -4.75,3.75 -4.75,2.75 ; -3.25,-2.75 -3.25,-3.75 -2.75,-3.75 -2.75,-2.75 ; -3.25,2.75 -3.25,3.75 -2.75,3.75 -2.75,2.75 ; -1.25,-2.75 -1.25,-3.75 -0.75,-3.75 -0.75,-2.75 ; -1.25,2.75 -1.25,3.75 -0.75,3.75 -0.75,2.75 ; 0.75,-2.75 0.75,-3.75 1.25,-3.75 1.25,-2.75 ; 0.75,2.75 0.75,3.75 1.25,3.75 1.25,2.75 ; 2.75,-2.75 2.75,-3.75 3.25,-3.75 3.25,-2.75 ; 2.75,2.75 2.75,3.75 3.25,3.75 3.25,2.75 ; 4.75,-2.75 4.75,-3.75 5.25,-3.75 5.25,-2.75 ; 4.75,2.75 4.75,3.75 5.25,3.75 5.25,2.75 ; 6.75,-2.75 6.75,-3.75 7.25,-3.75 7.25,-2.75 ; 6.75,2.75 6.75,3.75 7.25,3.75 7.25,2.75 ; 8.75,-2.75 8.75,-3.75 9.25,-3.75 9.25,-2.75 ; 8.75,2.75 8.75,3.75 9.25,3.75 9.25,2.75 ; -13.625,-2.75 -13.625,2.75 13.625,2.75 13.625,-2.75 -13.625,-2.75
Top Designator:
  text ".Designator" at -3.647,-0.357 h1
Top 3D Body:
  rectangle: -2,-2.75 2,-1.95
  lines w0.1: -9.25,-2.75 -9.25,-3.75 -8.75,-3.75 -8.75,-2.75 ; -9.25,2.75 -9.25,3.75 -8.75,3.75 -8.75,2.75 ; -7.25,-2.75 -7.25,-3.75 -6.75,-3.75 -6.75,-2.75 ; -7.25,2.75 -7.25,3.75 -6.75,3.75 -6.75,2.75 ; -5.25,-2.75 -5.25,-3.75 -4.75,-3.75 -4.75,-2.75 ; -5.25,2.75 -5.25,3.75 -4.75,3.75 -4.75,2.75 ; -3.25,-2.75 -3.25,-3.75 -2.75,-3.75 -2.75,-2.75 ; -3.25,2.75 -3.25,3.75 -2.75,3.75 -2.75,2.75 ; -1.25,-2.75 -1.25,-3.75 -0.75,-3.75 -0.75,-2.75 ; -1.25,2.75 -1.25,3.75 -0.75,3.75 -0.75,2.75 ; 0.75,-2.75 0.75,-3.75 1.25,-3.75 1.25,-2.75 ; 0.75,2.75 0.75,3.75 1.25,3.75 1.25,2.75 ; 2.75,-2.75 2.75,-3.75 3.25,-3.75 3.25,-2.75 ; 2.75,2.75 2.75,3.75 3.25,3.75 3.25,2.75 ; 4.75,-2.75 4.75,-3.75 5.25,-3.75 5.25,-2.75 ; 4.75,2.75 4.75,3.75 5.25,3.75 5.25,2.75 ; 6.75,-2.75 6.75,-3.75 7.25,-3.75 7.25,-2.75 ; 6.75,2.75 6.75,3.75 7.25,3.75 7.25,2.75 ; 8.75,-2.75 8.75,-3.75 9.25,-3.75 9.25,-2.75 ; 8.75,2.75 8.75,3.75 9.25,3.75 9.25,2.75 ; -13.625,-2.75 13.625,-2.75 13.625,2.75 -13.625,2.75 -13.625,-2.75
Top Courtyard:
  lines w0.05: -13.975,-4.05 13.975,-4.05 13.975,4.05 -13.975,4.05 -13.975,-4.05
Top Component Center:
  lines w0.1: -0.5,0 0.5,0 ; 0,-0.5 0,0.5
3D body "62532020621 (rev1).stp": height 8.55, standoff 0, extent -13.625,-3.75 13.625,3.75

## 62532620621 [mm] "2.00mm Male SMT Box Header, 26p"
height 6.8
pads (26):
  rect 1x2.85 smd: 1(-12,-2.425) 2(-12,2.425) 3(-10,-2.425) 4(-10,2.425) 5(-8,-2.425) 6(-8,2.425) 7(-6,-2.425) 8(-6,2.425) 9(-4,-2.425) 10(-4,2.425) 11(-2,-2.425) 12(-2,2.425) 13(0,-2.425) 14(0,2.425) 15(2,-2.425) 16(2,2.425) 17(4,-2.425) 18(4,2.425) 19(6,-2.425) 20(6,2.425) 21(8,-2.425) 22(8,2.425) 23(10,-2.425) 24(10,2.425) 25(12,-2.425) 26(12,2.425)
Top Overlay:
  circle w0.25: c-12,-4.3 r0.125
  lines w0.2: -12.8,-2.85 -16.775,-2.85 -16.775,2.85 -12.8,2.85 ; 12.8,-2.85 16.775,-2.85 16.775,2.85 12.8,2.85
Top Assembly:
  rectangle: -2,-2.75 2,-1.95
  lines w0.1: -12.25,-2.75 -12.25,-3.75 -11.75,-3.75 -11.75,-2.75 ; -12.25,2.75 -12.25,3.75 -11.75,3.75 -11.75,2.75 ; -10.25,-2.75 -10.25,-3.75 -9.75,-3.75 -9.75,-2.75 ; -10.25,2.75 -10.25,3.75 -9.75,3.75 -9.75,2.75 ; -8.25,-2.75 -8.25,-3.75 -7.75,-3.75 -7.75,-2.75 ; -8.25,2.75 -8.25,3.75 -7.75,3.75 -7.75,2.75 ; -6.25,-2.75 -6.25,-3.75 -5.75,-3.75 -5.75,-2.75 ; -6.25,2.75 -6.25,3.75 -5.75,3.75 -5.75,2.75 ; -4.25,-2.75 -4.25,-3.75 -3.75,-3.75 -3.75,-2.75 ; -4.25,2.75 -4.25,3.75 -3.75,3.75 -3.75,2.75 ; -2.25,-2.75 -2.25,-3.75 -1.75,-3.75 -1.75,-2.75 ; -2.25,2.75 -2.25,3.75 -1.75,3.75 -1.75,2.75 ; -0.25,-2.75 -0.25,-3.75 0.25,-3.75 0.25,-2.75 ; -0.25,2.75 -0.25,3.75 0.25,3.75 0.25,2.75 ; 1.75,-2.75 1.75,-3.75 2.25,-3.75 2.25,-2.75 ; 1.75,2.75 1.75,3.75 2.25,3.75 2.25,2.75 ; 3.75,-2.75 3.75,-3.75 4.25,-3.75 4.25,-2.75 ; 3.75,2.75 3.75,3.75 4.25,3.75 4.25,2.75 ; 5.75,-2.75 5.75,-3.75 6.25,-3.75 6.25,-2.75 ; 5.75,2.75 5.75,3.75 6.25,3.75 6.25,2.75 ; 7.75,-2.75 7.75,-3.75 8.25,-3.75 8.25,-2.75 ; 7.75,2.75 7.75,3.75 8.25,3.75 8.25,2.75 ; 9.75,-2.75 9.75,-3.75 10.25,-3.75 10.25,-2.75 ; 9.75,2.75 9.75,3.75 10.25,3.75 10.25,2.75 ; 11.75,-2.75 11.75,-3.75 12.25,-3.75 12.25,-2.75 ; 11.75,2.75 11.75,3.75 12.25,3.75 12.25,2.75 ; -16.625,-2.75 -16.625,2.75 16.625,2.75 16.625,-2.75 -16.625,-2.75
Top Designator:
  text ".Designator" at -3.647,-0.357 h1
Top 3D Body:
  rectangle: -2,-2.75 2,-1.95
  lines w0.1: -12.25,-2.75 -12.25,-3.75 -11.75,-3.75 -11.75,-2.75 ; -12.25,2.75 -12.25,3.75 -11.75,3.75 -11.75,2.75 ; -10.25,-2.75 -10.25,-3.75 -9.75,-3.75 -9.75,-2.75 ; -10.25,2.75 -10.25,3.75 -9.75,3.75 -9.75,2.75 ; -8.25,-2.75 -8.25,-3.75 -7.75,-3.75 -7.75,-2.75 ; -8.25,2.75 -8.25,3.75 -7.75,3.75 -7.75,2.75 ; -6.25,-2.75 -6.25,-3.75 -5.75,-3.75 -5.75,-2.75 ; -6.25,2.75 -6.25,3.75 -5.75,3.75 -5.75,2.75 ; -4.25,-2.75 -4.25,-3.75 -3.75,-3.75 -3.75,-2.75 ; -4.25,2.75 -4.25,3.75 -3.75,3.75 -3.75,2.75 ; -2.25,-2.75 -2.25,-3.75 -1.75,-3.75 -1.75,-2.75 ; -2.25,2.75 -2.25,3.75 -1.75,3.75 -1.75,2.75 ; -0.25,-2.75 -0.25,-3.75 0.25,-3.75 0.25,-2.75 ; -0.25,2.75 -0.25,3.75 0.25,3.75 0.25,2.75 ; 1.75,-2.75 1.75,-3.75 2.25,-3.75 2.25,-2.75 ; 1.75,2.75 1.75,3.75 2.25,3.75 2.25,2.75 ; 3.75,-2.75 3.75,-3.75 4.25,-3.75 4.25,-2.75 ; 3.75,2.75 3.75,3.75 4.25,3.75 4.25,2.75 ; 5.75,-2.75 5.75,-3.75 6.25,-3.75 6.25,-2.75 ; 5.75,2.75 5.75,3.75 6.25,3.75 6.25,2.75 ; 7.75,-2.75 7.75,-3.75 8.25,-3.75 8.25,-2.75 ; 7.75,2.75 7.75,3.75 8.25,3.75 8.25,2.75 ; 9.75,-2.75 9.75,-3.75 10.25,-3.75 10.25,-2.75 ; 9.75,2.75 9.75,3.75 10.25,3.75 10.25,2.75 ; 11.75,-2.75 11.75,-3.75 12.25,-3.75 12.25,-2.75 ; 11.75,2.75 11.75,3.75 12.25,3.75 12.25,2.75 ; -16.625,-2.75 16.625,-2.75 16.625,2.75 -16.625,2.75 -16.625,-2.75
Top Courtyard:
  lines w0.05: -16.975,-4.05 16.975,-4.05 16.975,4.05 -16.975,4.05 -16.975,-4.05
Top Component Center:
  lines w0.1: -0.5,0 0.5,0 ; 0,-0.5 0,0.5
3D body "62532620621 (rev1).stp": height 8.55, standoff 0, extent -16.625,-3.75 16.625,3.75